# Altium footprint library Connectors-FFC_FPC.PcbLib: 71 footprints (part 5 of 5)
Each footprint in its own frame and in the unit in brackets; x right, y up, seen from the top. Pads: shape width x height; smd on the part's side, far side on the other; paste and mask are expansions set on the pad; w line width, h text height; cw(c..) or ccw(c..) is an arc to the next point about the centre after c.
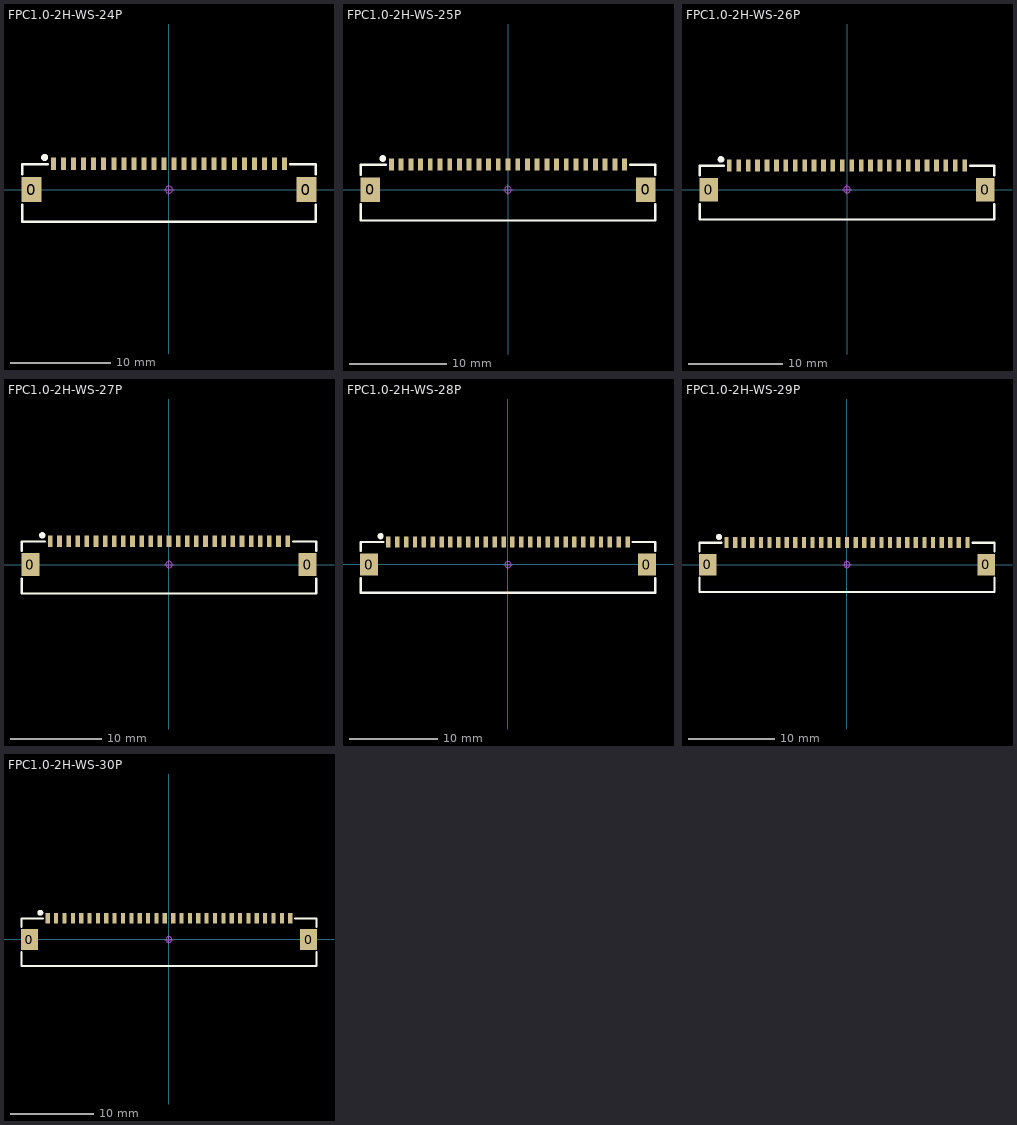
[diagram p4: the footprints below, top view; thin cyan lines are the x and y axes]

## FPC1.0-2H-WS-24P [mm] "翻盖FPC，脚距1mm，不含脚（长28.9mm，宽5.2mm，高1.96mm）"
pads (26):
  rect 2x2.5 smd: 0(-13.69,0) 0(13.69,0)
  rect 0.5x1.25 smd: 1(-11.5,2.575) 2(-10.5,2.575) 3(-9.5,2.575) 4(-8.5,2.575) 5(-7.5,2.575) 6(-6.5,2.575) 7(-5.5,2.575) 8(-4.5,2.575) 9(-3.5,2.575) 10(-2.5,2.575) 11(-1.5,2.575) 12(-0.5,2.575) 13(0.5,2.575) 14(1.5,2.575) 15(2.5,2.575) 16(3.5,2.575) 17(4.5,2.575) 18(5.5,2.575) 19(6.5,2.575) 20(7.5,2.575) 21(8.5,2.575) 22(9.5,2.575) 23(10.5,2.575) 24(11.5,2.575)
Top Overlay:
  circle w0.5: c-12.389,3.21 r0.1
  lines w0.254: -14.636,-1.524 -14.636,-3.175 14.634,-3.175 14.634,-1.524 ; -14.636,1.524 -14.636,2.54 -12.096,2.54 ; 12.094,2.54 14.634,2.54 14.634,1.524
Mechanical 15:
  circle w0.05: c0,0 r0.35
  lines w0.05: -0.5,0 0.5,0 ; 0,-0.5 0,0.5
3D body "FPC1.0 2H-WS-24P.STEP": height 2, standoff -0.02, extent -14.45,-3.15 14.45,2.85

## FPC1.0-2H-WS-25P [mm] "翻盖FPC，脚距1mm，不含脚（长29.9mm，宽5.2mm，高1.96mm）"
pads (27):
  rect 2x2.5 smd: 0(-14.19,0) 0(14.19,0)
  rect 0.5x1.25 smd: 1(-12,2.575) 2(-11,2.575) 3(-10,2.575) 4(-9,2.575) 5(-8,2.575) 6(-7,2.575) 7(-6,2.575) 8(-5,2.575) 9(-4,2.575) 10(-3,2.575) 11(-2,2.575) 12(-1,2.575) 13(0,2.575) 14(1,2.575) 15(2,2.575) 16(3,2.575) 17(4,2.575) 18(5,2.575) 19(6,2.575) 20(7,2.575) 21(8,2.575) 22(9,2.575) 23(10,2.575) 24(11,2.575) 25(12,2.575)
Top Overlay:
  circle w0.5: c-12.889,3.21 r0.1
  lines w0.254: -15.136,-1.524 -15.136,-3.175 15.134,-3.175 15.134,-1.524 ; -15.136,1.524 -15.136,2.54 -12.596,2.54 ; 12.594,2.54 15.134,2.54 15.134,1.524
Mechanical 15:
  circle w0.05: c0,0 r0.35
  lines w0.05: -0.5,0 0.5,0 ; 0,-0.5 0,0.5
3D body "FPC1.0 2H-WS-25P.STEP": height 2, standoff -0.02, extent -14.95,-3.15 14.95,2.85

## FPC1.0-2H-WS-26P [mm] "翻盖FPC，脚距1mm，不含脚（长30.9mm，宽5.2mm，高1.96mm）"
pads (28):
  rect 2x2.5 smd: 0(-14.69,0) 0(14.69,0)
  rect 0.5x1.25 smd: 1(-12.5,2.575) 2(-11.5,2.575) 3(-10.5,2.575) 4(-9.5,2.575) 5(-8.5,2.575) 6(-7.5,2.575) 7(-6.5,2.575) 8(-5.5,2.575) 9(-4.5,2.575) 10(-3.5,2.575) 11(-2.5,2.575) 12(-1.5,2.575) 13(-0.5,2.575) 14(0.5,2.575) 15(1.5,2.575) 16(2.5,2.575) 17(3.5,2.575) 18(4.5,2.575) 19(5.5,2.575) 20(6.5,2.575) 21(7.5,2.575) 22(8.5,2.575) 23(9.5,2.575) 24(10.5,2.575) 25(11.5,2.575) 26(12.5,2.575)
Top Overlay:
  circle w0.5: c-13.389,3.21 r0.1
  lines w0.254: -15.636,-1.524 -15.636,-3.175 15.634,-3.175 15.634,-1.524 ; -15.636,1.524 -15.636,2.54 -13.096,2.54 ; 13.094,2.54 15.634,2.54 15.634,1.524
Mechanical 15:
  circle w0.05: c0,0 r0.35
  lines w0.05: -0.5,0 0.5,0 ; 0,-0.5 0,0.5
3D body "FPC1.0 2H-WS-26P.STEP": height 2, standoff -0.02, extent -15.45,-3.15 15.45,2.85

## FPC1.0-2H-WS-27P [mm] "翻盖FPC，脚距1mm，不含脚（长31.9mm，宽5.2mm，高1.96mm）"
pads (29):
  rect 2x2.5 smd: 0(-15.19,0) 0(15.19,0)
  rect 0.5x1.25 smd: 1(-13,2.575) 2(-12,2.575) 3(-11,2.575) 4(-10,2.575) 5(-9,2.575) 6(-8,2.575) 7(-7,2.575) 8(-6,2.575) 9(-5,2.575) 10(-4,2.575) 11(-3,2.575) 12(-2,2.575) 13(-1,2.575) 14(0,2.575) 15(1,2.575) 16(2,2.575) 17(3,2.575) 18(4,2.575) 19(5,2.575) 20(6,2.575) 21(7,2.575) 22(8,2.575) 23(9,2.575) 24(10,2.575) 25(11,2.575) 26(12,2.575) 27(13,2.575)
Top Overlay:
  circle w0.5: c-13.889,3.21 r0.1
  lines w0.254: -16.136,-1.524 -16.136,-3.175 16.134,-3.175 16.134,-1.524 ; -16.136,1.524 -16.136,2.54 -13.596,2.54 ; 13.594,2.54 16.134,2.54 16.134,1.524
Mechanical 15:
  circle w0.05: c0,0 r0.35
  lines w0.05: -0.5,0 0.5,0 ; 0,-0.5 0,0.5
3D body "FPC1.0 2H-WS-27P.STEP": height 2, standoff -0.02, extent -15.95,-3.15 15.95,2.85

## FPC1.0-2H-WS-28P [mm] "翻盖FPC，脚距1mm，不含脚（长32.9mm，宽5.2mm，高1.96mm）"
pads (30):
  rect 2x2.5 smd: 0(-15.69,-0.04) 0(15.69,-0.04)
  rect 0.5x1.25 smd: 1(-13.5,2.535) 2(-12.5,2.535) 3(-11.5,2.535) 4(-10.5,2.535) 5(-9.5,2.535) 6(-8.5,2.535) 7(-7.5,2.535) 8(-6.5,2.535) 9(-5.5,2.535) 10(-4.5,2.535) 11(-3.5,2.535) 12(-2.5,2.535) 13(-1.5,2.535) 14(-0.5,2.535) 15(0.5,2.535) 16(1.5,2.535) 17(2.5,2.535) 18(3.5,2.535) 19(4.5,2.535) 20(5.5,2.535) 21(6.5,2.535) 22(7.5,2.535) 23(8.5,2.535) 24(9.5,2.535) 25(10.5,2.535) 26(11.5,2.535) 27(12.5,2.535) 28(13.5,2.535)
Top Overlay:
  circle w0.5: c-14.389,3.17 r0.1
  lines w0.254: -16.636,-1.564 -16.636,-3.215 16.634,-3.215 16.634,-1.564 ; -16.636,1.484 -16.636,2.5 -14.096,2.5 ; 14.094,2.5 16.634,2.5 16.634,1.484
Mechanical 15:
  circle w0.05: c0,-0.04 r0.35
  lines w0.05: -0.5,-0.04 0.5,-0.04 ; 0,-0.54 0,0.46
3D body "FPC1.0 2H-WS-28P.STEP": height 2, standoff -0.02, extent -16.45,-3.19 16.45,2.81

## FPC1.0-2H-WS-29P [mm] "翻盖FPC，脚距1mm，不含脚（长33.9mm，宽5.2mm，高1.96mm）"
pads (31):
  rect 2x2.5 smd: 0(-16.19,0) 0(16.19,0)
  rect 0.5x1.25 smd: 1(-14,2.575) 2(-13,2.575) 3(-12,2.575) 4(-11,2.575) 5(-10,2.575) 6(-9,2.575) 7(-8,2.575) 8(-7,2.575) 9(-6,2.575) 10(-5,2.575) 11(-4,2.575) 12(-3,2.575) 13(-2,2.575) 14(-1,2.575) 15(0,2.575) 16(1,2.575) 17(2,2.575) 18(3,2.575) 19(4,2.575) 20(5,2.575) 21(6,2.575) 22(7,2.575) 23(8,2.575) 24(9,2.575) 25(10,2.575) 26(11,2.575) 27(12,2.575) 28(13,2.575) 29(14,2.575)
Top Overlay:
  circle w0.5: c-14.889,3.21 r0.1
  lines w0.254: -17.136,-1.524 -17.136,-3.175 17.134,-3.175 17.134,-1.524 ; -17.136,1.524 -17.136,2.54 -14.596,2.54 ; 14.594,2.54 17.134,2.54 17.134,1.524
Mechanical 15:
  circle w0.05: c0,0 r0.35
  lines w0.05: -0.5,0 0.5,0 ; 0,-0.5 0,0.5
3D body "FPC1.0 2H-WS-29P.STEP": height 2, standoff -0.02, extent -16.95,-3.15 16.95,2.85

## FPC1.0-2H-WS-30P [mm] "翻盖FPC，脚距1mm，不含脚（长34.9mm，宽5.2mm，高1.96mm）"
pads (32):
  rect 2x2.5 smd: 0(-16.69,-0.04) 0(16.69,-0.04)
  rect 0.5x1.25 smd: 1(-14.5,2.535) 2(-13.5,2.535) 3(-12.5,2.535) 4(-11.5,2.535) 5(-10.5,2.535) 6(-9.5,2.535) 7(-8.5,2.535) 8(-7.5,2.535) 9(-6.5,2.535) 10(-5.5,2.535) 11(-4.5,2.535) 12(-3.5,2.535) 13(-2.5,2.535) 14(-1.5,2.535) 15(-0.5,2.535) 16(0.5,2.535) 17(1.5,2.535) 18(2.5,2.535) 19(3.5,2.535) 20(4.5,2.535) 21(5.5,2.535) 22(6.5,2.535) 23(7.5,2.535) 24(8.5,2.535) 25(9.5,2.535) 26(10.5,2.535) 27(11.5,2.535) 28(12.5,2.535) 29(13.5,2.535) 30(14.5,2.535)
Top Overlay:
  circle w0.5: c-15.389,3.17 r0.1
  lines w0.254: -17.636,-1.564 -17.636,-3.215 17.634,-3.215 17.634,-1.564 ; -17.636,1.484 -17.636,2.5 -15.096,2.5 ; 15.094,2.5 17.634,2.5 17.634,1.484
Mechanical 15:
  circle w0.05: c0,-0.04 r0.35
  lines w0.05: -0.5,-0.04 0.5,-0.04 ; 0,-0.54 0,0.46
3D body "FPC1.0 2H-WS-30P.STEP": height 2, standoff -0.02, extent -17.45,-3.19 17.45,2.81